# Altium footprint library MOD_DRV.PcbLib: 37 footprints (part 3 of 3)
Each footprint in its own frame and in the unit in brackets; x right, y up, seen from the top. Pads: shape width x height; smd on the part's side, far side on the other; paste and mask are expansions set on the pad; w line width, h text height; cw(c..) or ccw(c..) is an arc to the next point about the centre after c.
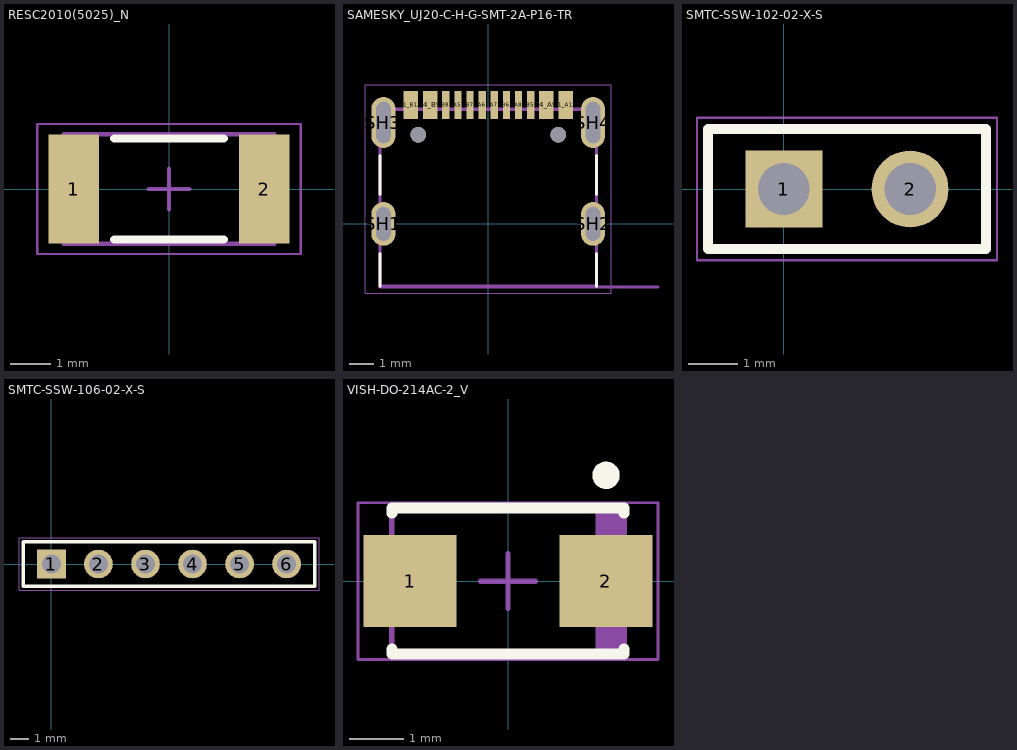
[diagram p2: the footprints below, top view; thin cyan lines are the x and y axes]

## RESC2010(5025)_N [mm] "Chip Resistor, Body 5.0x2.5mm, IPC Medium Density"
height 0.71
pads (2):
  rect 1.25x2.7 smd: 1(-2.35,0) 2(2.35,0)
Top Overlay:
  lines w0.2: -1.35,-1.25 1.35,-1.25 ; -1.35,1.25 1.35,1.25
Top 3D Body:
  lines w0.1: -2.6,-1.35 -2.6,1.35 2.6,1.35 2.6,-1.35 -2.6,-1.35
Top Courtyard:
  lines w0.05: -3.25,-1.6 -3.25,1.6 3.25,1.6 3.25,-1.6 -3.25,-1.6
  lines w0.1: -0.5,0 0.5,0 ; 0,-0.5 0,0.5
3D body: height 0.71, standoff 0, extent -2.6,-1.35 -1.98,1.35
3D body: height 0.71, standoff 0, extent -1.98,-1.35 1.98,1.35
3D body: height 0.71, standoff 0, extent 1.98,-1.35 2.6,1.35

## SAMESKY_UJ20-C-H-G-SMT-2A-P16-TR [mm]
height 3.2
pads (18):
  rect 0.6x1.15 smd paste+0 mask+0.102: A1_B12(-3.2,4.905) A4_B9(-2.4,4.905) B1_A12(3.2,4.905) B4_A9(2.4,4.905)
  rect 0.3x1.15 smd paste+0 mask+0.102: A5(-1.25,4.905) A6(-0.25,4.905) A7(0.25,4.905) A8(1.25,4.905) B5(1.75,4.905) B6(0.75,4.905) B7(-0.75,4.905) B8(-1.75,4.905)
  oval 1x1.8 hole 0.6 slot 1.4 at 90 deg mask+0.102: SH1(-4.32,0) SH2(4.32,0)
  oval 1x2.1 hole 0.6 slot 1.7 at 90 deg mask+0.102: SH3(-4.32,4.18) SH4(4.32,4.18)
  round 0.65 hole 0.65 unplated mask+0: ""(-2.89,3.68) ""(2.89,3.68)
Top Overlay:
  lines w0.127: -4.47,-2.57 -4.47,-1.22 ; -4.47,1.22 -4.47,2.81 ; 4.47,-2.57 4.47,-1.22 ; 4.47,1.22 4.47,2.81
Top 3D Body:
  lines w0.127: -4.47,-2.6 7,-2.6 ; -4.47,-2.57 4.47,-2.57 4.47,4.73 -4.47,4.73 -4.47,-2.57
  text "PCB edge" at 5.25,-2.25 h0.81
Top Courtyard:
  lines w0.05: -5.07,-2.85 5.07,-2.85 5.07,5.73 -5.07,5.73 -5.07,-2.85
3D body "step_temp.STEP": height 3.19, standoff -0.97, extent -4.47,-2.641 4.47,5.159

## SMTC-SSW-102-02-X-S [mm] "SQ Post Socket, 1x2 Pins, Vertical, 2.54mm Pitch, Female"
height 8.51
pads (2):
  rect 1.55x1.55 hole 1.04: 1(0,0)
  round 1.55 hole 1.04: 2(2.54,0)
Top Overlay:
  lines w0.2: -1.525,-1.205 -1.525,1.205 4.065,1.205 4.065,-1.205 -1.525,-1.205
Top 3D Body:
  lines w0.1: -1.525,-1.205 -1.525,1.205 4.065,1.205 4.065,-1.205 -1.525,-1.205
Top Courtyard:
  lines w0.05: -1.75,-1.43 4.29,-1.43 4.29,1.43 -1.75,1.43 -1.75,-1.43
3D body "SSW-102-02-X-S.step": height 8.51, standoff -4.93, extent -1.524,-1.206 4.064,1.207

## SMTC-SSW-106-02-X-S [mm] "SQ Post Socket, 1x6 Pins, Vertical, 2.54mm Pitch, Female"
height 8.51
pads (6):
  rect 1.55x1.55 hole 1.04: 1(0,0)
  round 1.55 hole 1.04: 2(2.54,0) 3(5.08,0) 4(7.62,0) 5(10.16,0) 6(12.7,0)
Top Overlay:
  lines w0.2: -1.525,-1.205 -1.525,1.205 14.225,1.205 14.225,-1.205 -1.525,-1.205
Top 3D Body:
  lines w0.1: -1.525,-1.205 -1.525,1.205 14.225,1.205 14.225,-1.205 -1.525,-1.205
Top Courtyard:
  lines w0.05: -1.75,-1.43 -1.75,1.43 14.45,1.43 14.45,-1.43 -1.75,-1.43
3D body "SSW-106-02-X-S.step": height 8.51, standoff -4.93, extent -1.524,-1.206 14.224,1.207

## VISH-DO-214AC-2_V [mm] "SMA, 2-Leads, Body 4.245x2.665mm, Height 2.29mm"
height 2.29
pads (2):
  rect 1.7x1.68 smd: 1(-1.79,0) 2(1.79,0)
Top Overlay:
  circle w0.25: c1.79,1.933 r0.125
  lines w0.2: -2.123,-1.24 -2.123,-1.332 2.123,-1.332 2.123,-1.24 ; -2.123,1.24 -2.123,1.332 2.123,1.332 2.123,1.24
Top 3D Body:
  rectangle: 1.6,-1.3 2.1,1.3
  lines w0.1: -2.122,-1.333 2.122,-1.333 2.122,1.333 -2.122,1.333 -2.122,-1.333
Top Courtyard:
  lines w0.05: -2.74,-1.432 -2.74,1.432 2.74,1.433 2.74,-1.432 -2.74,-1.433
  lines w0.1: -0.5,0 0.5,0 ; 0,-0.5 0,0.5
3D body: height 2.29, standoff 0, extent -2.122,-1.333 2.122,1.333
3D body: height -0.41, standoff -1.67, extent 1.16,-0.725 2.567,0.725
3D body: height -0.41, standoff -1.67, extent -2.567,-0.725 -1.16,0.725